# EAGLE library part 6100XX21121_61003621121 (library WR-PHD)
WR-PHD 2.54 mm SMT Dual Pin Header ARTICLE PROPERTIES: Pins:4;​ 6;​ 8;​ 10;​ 12;​ 14;​ 16;​ 20;​ 22;​ 24;​ 26;​ 32;​ 34;​ 36 KIND PROPERTIES: Pitch：2.54 mm Quality Class:3 as per CECC 75 301-802 Rows：Dual Gender：Pin Header Type：Straight MATERIAL PROPERTIES: Insulator Material :PA6T Insulator Flammability Rating:UL94 V-0 Contact Material:Copper Alloy Contact Plating:Gold Contact Type:Stamped GENERAL INFORMATION Operating Temperature:-40 up to +125 °C Compliance:Lead free / RoHS ELECTRICAL PROPERTIES: Rated Current:3 A IR 1:3 A Withstanding Voltage:500 V (AC) Contact Resistance:20 mΩ RISO:1000 MΩ CERTIFICATION UL Approval:E323964 PACKAGING PROPERTIES Packaging:Tube <https://katalog.we-online.com/media/images/v2/o33205v209%20Family_WR-PHD_610xxx21121.jpg> Details see: https://katalog.we-online.com/en/em/PHD_2_54_SMT_DUAL_PIN_HEADER_6100XX21121 Updated by Yingchun,Shan 2019-10-18 2019 (C) Würth Elektronik
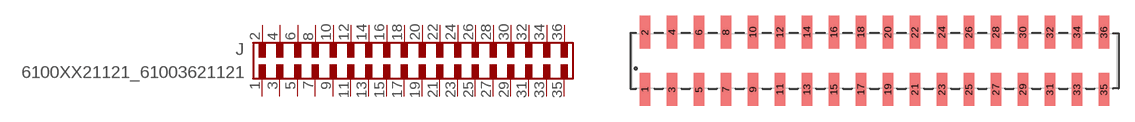
[diagram p147: symbol with the pads of 61003621121; footprint 61003621121]

Designator prefix J

## 6100XX21121_61003621121 (DATASHEET-URL: https://www.we-online.com/redexpert/spec/61003621121?ae; GENDER: Pin Header; IR: 3A; MOUNT: SMT; PACKAGING: Tube; PART-NUMBER: 61003621121; PINS: 36; PITCH: 2.54 mm; ROWS: Dual; TYPE: Straight; VALUE: 61003621121)  [61003621121]
1  1  pas
2  2  pas
3  3  pas
4  4  pas
5  5  pas
6  6  pas
7  7  pas
8  8  pas
9  9  pas
10  10  pas
11  11  pas
12  12  pas
13  13  pas
14  14  pas
15  15  pas
16  16  pas
17  17  pas
18  18  pas
19  19  pas
20  20  pas
21  21  pas
22  22  pas
23  23  pas
24  24  pas
25  25  pas
26  26  pas
27  27  pas
28  28  pas
29  29  pas
30  30  pas
31  31  pas
32  32  pas
33  33  pas
34  34  pas
35  35  pas
36  36  pas

## Footprint 61003621121 (pad centres in mm)
WR-PHD 2.54 mm SMT Dual Pin Header, 36 Pins
smd 1 x 3.1: 1 -21.59,-2.7; 2 -21.59,2.7; 3 -19.05,-2.7; 4 -19.05,2.7; 5 -16.51,-2.7; 6 -16.51,2.7; 7 -13.97,-2.7; 8 -13.97,2.7; 9 -11.43,-2.7; 10 -11.43,2.7; 11 -8.89,-2.7; 12 -8.89,2.7; 13 -6.35,-2.7; 14 -6.35,2.7; 15 -3.81,-2.7; 16 -3.81,2.7; 17 -1.27,-2.7; 18 -1.27,2.7; 19 1.27,-2.7; 20 1.27,2.7; 21 3.81,-2.7; 22 3.81,2.7; 23 6.35,-2.7; 24 6.35,2.7; 25 8.89,-2.7; 26 8.89,2.7; 27 11.43,-2.7; 28 11.43,2.7; 29 13.97,-2.7; 30 13.97,2.7; 31 16.51,-2.7; 32 16.51,2.7; 33 19.05,-2.7; 34 19.05,2.7; 35 21.59,-2.7; 36 21.59,2.7